# Altium footprint library TitansLib.PcbLib: 333 footprints (part 6 of 21)
Each footprint in its own frame and in the unit in brackets; x right, y up, seen from the top. Pads: shape width x height; smd on the part's side, far side on the other; paste and mask are expansions set on the pad; w line width, h text height; cw(c..) or ccw(c..) is an arc to the next point about the centre after c.
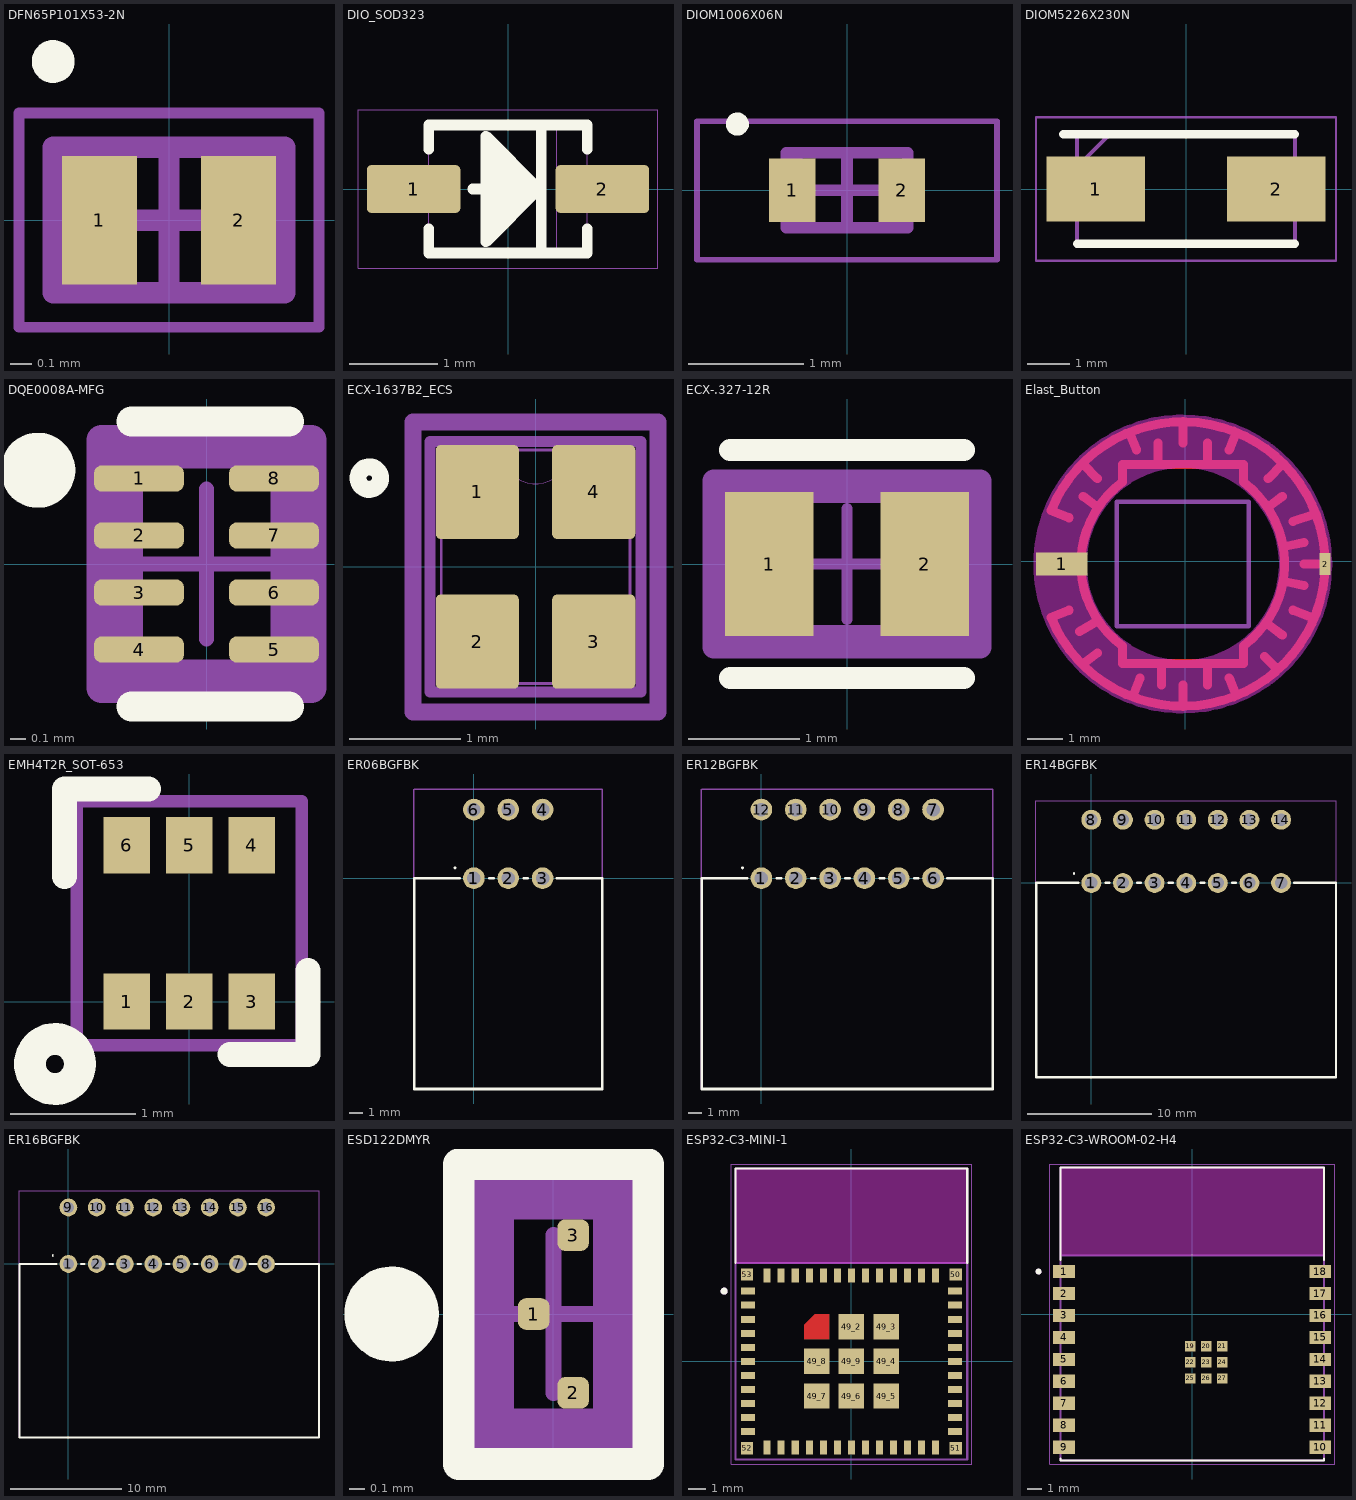
[diagram p5: the footprints below, top view; thin cyan lines are the x and y axes]

## DFN65P101X53-2N [mm] "DFN, 2-Leads, Body 0.61x1.01mm, Pitch 0.65mm, IPC Medium Density"
height 0.53
pads (2):
  rect 0.35x0.6 smd mask+0.05: 1(-0.325,0) 2(0.325,0)
Top Overlay:
  circle w0.1: c-0.54,0.74 r0.05
Top Courtyard:
  lines w0.05: -0.7,-0.5 0.7,-0.5 0.7,0.5 -0.7,0.5 -0.7,-0.5
  lines w0.1: -0.325,0 0.325,0 ; 0,-0.34 0,0.34
Top Assembly:
  lines w0.1: -0.54,-0.34 0.54,-0.34 0.54,0.34 -0.54,0.34 -0.54,-0.34
  text ".Designator" at -0.7,0.508 h1
3D body: height 0.53, standoff 0, extent -0.54,-0.34 0.54,0.34

## DIO_SOD323 [mm]
height 1.17
pads (2):
  rrect18% 1.06x0.54 smd mask+0.05: 1(-1.07,0) 2(1.07,0)
Top Overlay:
  lines w0.12: -0.9,-0.45 -0.9,-0.725 0.9,-0.725 0.9,-0.45 ; -0.9,0.45 -0.9,0.725 0.9,0.725 0.9,0.45 ; -0.4,0 0.35,0 ; -0.15,-0.45 -0.15,0.45 ; -0.075,-0.375 -0.075,0.4 ; -0.025,-0.325 -0.025,0.35 ; 0.075,-0.2 0.075,0.225 ; 0.175,-0.1 0.175,0.125 ; 0.375,-0.725 0.375,0.725 ; 0.35,0 -0.25,0.6 -0.25,-0.6 0.35,0
Top Courtyard:
  lines w0.01: -1.7,-0.9 1.7,-0.9 1.7,0.9 -1.7,0.9 -1.7,-0.9
Top Assembly:
  lines w0.01: 0.55,-0.725 0.55,0.725 ; -0.9,-0.725 -0.9,0.725 0.9,0.725 0.9,-0.725 -0.9,-0.725
  text "K" at 1.892,-0.406 h1.2
3D body: height 1.17, standoff 0, extent -0.96,-0.785 0.96,0.785
3D body "SOD323.STEP": height 1.1, standoff 0, extent -1.3,-0.675 1.3,0.675

## DIOM1006X06N [mm] "Molded Diode, 2-Leads, Body 1,00x0,60mm, IPC Medium Density"
height 0.55
pads (2):
  rect 0.4x0.55 smd: 1(-0.475,0) 2(0.475,0)
Top Overlay:
  circle w0.1: c-0.95,0.575 r0.05
Top Courtyard:
  lines w0.05: -1.3,-0.6 1.3,-0.6 1.3,0.6 -1.3,0.6 -1.3,-0.6
  lines w0.1: -0.325,0 0.325,0 ; 0,-0.325 0,0.325
Top Assembly:
  rectangle: -0.525,-0.325 -0.384,0.325
  lines w0.1: -0.525,-0.325 0.525,-0.325 0.525,0.325 -0.525,0.325 -0.525,-0.325

## DIOM5226X230N [mm]
pads (2):
  rect 2.35x1.55 smd: 1(-2.15,0) 2(2.15,0)
Top Overlay:
  lines w0.2: -2.925,1.302 2.598,1.302 ; -2.598,-1.302 2.598,-1.302
Mechanical 13:
  lines w0.1: -2.598,0.528 -1.822,1.302 ; -2.598,-1.302 2.598,-1.302 2.598,1.302 -2.598,1.302 -2.598,-1.302
Mechanical 15:
  lines w0.05: -3.575,-1.71 3.575,-1.71 3.575,1.71 -3.575,1.71 -3.575,-1.71
3D body "B240A-13-F.stp": height 2.3, standoff 0, extent -2.598,-1.302 2.598,1.302

## DQE0008A-MFG [mm]
pads (8):
  rrect60% 0.6x0.175 smd paste+0 mask+0.05: 1(-0.45,0.571) 2(-0.45,0.19) 3(-0.45,-0.19) 4(-0.45,-0.571) 5(0.45,-0.571) 6(0.45,-0.19) 7(0.45,0.19) 8(0.45,0.571)
Top Overlay:
  circle w0.25: c-1.125,0.625 r0.125
  lines w0.2: -0.5,-0.95 0.55,-0.95 ; -0.5,0.95 0.55,0.95
Top 3D Body:
  lines w0.2: -0.525,-0.737 0.525,-0.737 0.525,0.737 -0.525,0.737 -0.525,-0.737
Top Courtyard:
  lines w0.2: -0.7,-0.825 0.7,-0.825 0.7,0.825 -0.7,0.825 -0.7,-0.825
Top Component Center:
  lines w0.1: -0.5,0 0.5,0 ; 0,-0.5 0,0.5
Top Assembly:
  lines w0.2: -0.7,-0.825 0.7,-0.825 0.7,0.825 -0.7,0.825 -0.7,-0.825
  text ".Designator" at -1.3,1.238 h1
3D body "IC_Texas_Instruments_LSF0102DQER_eec.STEP": height 0.25, standoff 0, extent -0.7,-0.825 0.7,0.825

## ECX-1637B2_ECS [mm]
pads (4):
  rrect12% 0.75x0.85 smd paste+0 mask+0.05: 1(-0.525,0.675) 2(-0.525,-0.675) 3(0.525,-0.675) 4(0.525,0.675)
Top Overlay:
  circle w0.152: c-1.5,0.8 r0.102
Top Assembly:
  lines w0.1: -0.951,-1.13 0.951,-1.13 0.951,1.13 -0.951,1.13 -0.951,-1.13
  text ".Designator" at -1.105,1.471 h1
Mechanical 13:
  circle w0: c-0.279,0.675 r0.076
  lines w0: -0.305,1.054 ccw(c0,1.054) 0.305,1.054
  lines w0.025: -0.851,-1.054 -0.851,1.054 0.851,1.054 0.851,-1.054 -0.851,-1.054
Mechanical 15:
  lines w0.152: -1.105,-1.308 1.105,-1.308 1.105,-1.259 1.105,1.259 1.105,1.308 -1.105,1.308 -1.105,1.259 -1.105,-1.259 -1.105,-1.308
3D body "ECS-400-10-37B2-CKY-TR.STEP": height 0.01, standoff -0.49, extent -0.8,-1 0.8,1

## ECX-.327-12R [mm]
pads (2):
  rect 0.8x1.3 smd paste+0 mask+0: 1(-0.7,0) 2(0.7,0)
Top Overlay:
  lines w0.2: -1.05,-1.025 1.05,-1.025 ; -1.05,1.025 1.05,1.025
Top 3D Body:
  lines w0.2: -1.05,-0.65 1.05,-0.65 1.05,0.65 -1.05,0.65 -1.05,-0.65
Top Courtyard:
  lines w0.2: -1.2,-0.75 1.2,-0.75 1.2,0.75 -1.2,0.75 -1.2,-0.75
Top Component Center:
  lines w0.1: -0.5,0 0.5,0 ; 0,-0.5 0,0.5
Top Assembly:
  lines w0.2: -1.2,-0.75 1.2,-0.75 1.2,0.75 -1.2,0.75 -1.2,-0.75
  text ".Designator" at -0.752,1.213 h1
3D body "Crys_ECS_International_ECS-_327-12_5-12R-TR_eec.STEP": height 0.25, standoff 0, extent -1.2,-0.75 1.2,0.75

## Elast_Button [mil]
pads (2):
  rect 57.09x25 smd paste+0: 1(-136.82,-2.95)
  rect 12x24 smd paste+0: 2(154.52,-2.95)
Top Layer:
  lines w10: -128.94,-54.13 -148.63,-62.01 ccw(c-2.95,-2.95) -148.63,56.11 -128.94,48.23 ; -117.13,-77.75 -97.45,-65.94 ; -113.2,-113.19 -97.45,-101.38 ; -113.2,71.85 -97.45,60.04 ; -113.2,107.29 -97.45,91.54 ; -62.02,142.72 -54.14,123.03 ; -58.08,-148.62 -50.2,-128.93 ; -30.52,130.91 -30.52,107.29 ; -26.58,-136.81 -26.58,-113.19 ; -2.96,-160.43 -2.96,-136.81 ; -2.96,130.91 -2.96,154.53 ; 24.6,-136.81 24.6,-113.19 ; 24.6,130.91 24.6,107.29 ; 48.22,-128.93 56.1,-148.62 ; 48.22,123.03 56.1,142.72 ; 87.59,-105.31 99.4,-117.12 ; 91.53,-69.88 107.28,-81.69 ; 91.53,60.04 107.28,71.85 ; 91.53,91.54 107.28,107.29 ; 111.21,-22.64 130.9,-26.57 ; 111.21,16.74 130.9,20.67 ; 119.09,-54.13 138.77,-62.01 ; 119.09,44.29 142.71,52.17 ; 130.9,-2.95 154.52,-2.95 ; -30.52,107.29 24.6,107.29 ; -30.52,107.29 -69.89,107.29 -69.89,87.6 ccw(c-2.96,-2.95) -69.89,-93.5 -69.89,-113.19 -26.58,-113.19 ; -26.58,-113.19 24.6,-113.19 ; 24.6,-113.19 63.97,-113.19 63.97,-93.5 ccw(c-2.96,-2.95) 63.97,87.6 63.97,107.29 24.6,107.29
Top Layer keep-out:
  circle w59.06: c-2.96,-2.95 r135.83
Top Solder:
  circle w55.12: c-2.96,-2.95 r134.67
Top Assembly:
  lines w5: -75.79,-71.85 -75.79,65.95 69.87,65.95 69.87,-71.85 -75.79,-71.85

## EMH4T2R_SOT-653 [mm]
pads (6):
  rect 0.37x0.45 smd mask+0.03: 1(-0.5,0) 2(0,0) 3(0.5,0) 4(0.5,1.25) 5(0,1.25) 6(-0.5,1.25)
Top Overlay:
  circle w0.254: c-1.075,-0.5 r0.2
  lines w0.2: -1,1 -1,1.7 -0.325,1.7 ; 0.325,-0.425 0.95,-0.425 0.95,0.25
Top Courtyard:
  lines w0.1: -0.9,-0.35 0.9,-0.35 0.9,1.6 -0.75,1.6 -0.9,1.6 -0.9,-0.35
3D body "EMH4T2R.stp": height 0.5, standoff -0.01, extent -0.8,-0.175 0.8,1.425

## ER06BGFBK [mm]
pads (6):
  round 1.6 hole 1: 1(0,0) 2(2.54,0) 3(5.08,0) 4(5.08,5.08) 5(2.54,5.08) 6(0,5.08)
Top Overlay:
  lines w0.1: -1.447,0.762 ccw(c-1.397,0.762) -1.347,0.762 ccw(c-1.397,0.762) -1.447,0.762
  lines w0.2: -1.067,0 -4.41,0 -4.41,-15.6 9.49,-15.6 9.49,0 6.147,0 ; 1.148,0 1.448,0 ; 3.688,0 3.988,0
Mechanical 13:
  lines w0.1: -4.41,0 -4.41,-15.6 9.49,-15.6 9.49,0
Mechanical 15:
  lines w0.1: -4.445,6.6 -4.445,-15.6 9.49,-15.6 9.49,6.6 -4.41,6.6
3D body: height 7.5, standoff 0, extent -4.445,-15.6 9.49,0

## ER12BGFBK [mm]
pads (12):
  round 1.6 hole 1: 1(0,0) 2(2.54,0) 3(5.08,0) 4(7.62,0) 5(10.16,0) 6(12.7,0) 7(12.7,5.08) 8(10.16,5.08) 9(7.62,5.08) 10(5.08,5.08) 11(2.54,5.08) 12(0,5.08)
Top Overlay:
  lines w0.1: -1.447,0.762 cw(c-1.397,0.762) -1.347,0.762 cw(c-1.397,0.762) -1.447,0.762
  lines w0.2: -1.067,0 -4.41,0 -4.41,-15.6 17.11,-15.6 17.11,0 13.767,0 ; 1.148,0 1.448,0 ; 3.688,0 3.988,0 ; 6.228,0 6.528,0 ; 8.768,0 9.068,0 ; 11.308,0 11.608,0
Mechanical 13:
  lines w0.1: -4.41,0 -4.41,-15.6 9.49,-15.6 ; 17.11,-15.6 17.11,0
Mechanical 15:
  lines w0.1: -4.445,6.6 -4.445,-15.6 9.49,-15.6 ; -4.41,6.6 17.11,6.6 17.11,-15.6
3D body: height 7.5, standoff 0, extent -4.445,-15.6 17.11,0

## ER14BGFBK [mm]
pads (14):
  round 1.6 hole 1: 1(0,0) 2(2.54,0) 3(5.08,0) 4(7.62,0) 5(10.16,0) 6(12.7,0) 7(15.24,0) 8(0,5.08) 9(2.54,5.08) 10(5.08,5.08) 11(7.62,5.08) 12(10.16,5.08) 13(12.7,5.08) 14(15.24,5.08)
Top Overlay:
  lines w0.1: -1.447,0.762 ccw(c-1.397,0.762) -1.347,0.762 ccw(c-1.397,0.762) -1.447,0.762
  lines w0.2: -1.067,0 -4.41,0 -4.41,-15.6 19.65,-15.6 19.65,0 16.307,0 ; 1.148,0 1.448,0 ; 3.688,0 3.988,0 ; 6.228,0 6.528,0 ; 8.768,0 9.068,0 ; 11.308,0 11.608,0
Mechanical 13:
  lines w0.1: -4.41,0 -4.41,-15.6 9.49,-15.6 ; 19.65,-15.6 19.65,0
Mechanical 15:
  lines w0.1: -4.445,6.6 -4.445,-15.6 9.49,-15.6 ; -4.41,6.6 19.65,6.6 19.65,-15.6
3D body: height 7.5, standoff 0, extent -4.445,-15.6 19.65,0

## ER16BGFBK [mm]
pads (16):
  round 1.6 hole 1: 1(0,0) 2(2.54,0) 3(5.08,0) 4(7.62,0) 5(10.16,0) 6(12.7,0) 7(15.24,0) 8(17.78,0) 9(0,5.08) 10(2.54,5.08) 11(5.08,5.08) 12(7.62,5.08) 13(10.16,5.08) 14(12.7,5.08) 15(15.24,5.08) 16(17.78,5.08)
Top Overlay:
  lines w0.1: -1.447,0.762 ccw(c-1.397,0.762) -1.347,0.762 ccw(c-1.397,0.762) -1.447,0.762
  lines w0.2: -1.067,0 -4.41,0 -4.41,-15.6 22.534,-15.6 22.534,0 16.307,0 ; 1.148,0 1.448,0 ; 3.688,0 3.988,0 ; 6.228,0 6.528,0 ; 8.768,0 9.068,0 ; 11.308,0 11.608,0
Mechanical 13:
  lines w0.1: -4.41,0 -4.41,-15.6 9.49,-15.6 ; 22.534,-15.6 22.534,0
Mechanical 15:
  lines w0.1: -4.445,6.6 -4.445,-15.6 9.49,-15.6 ; -4.41,6.6 22.534,6.6 22.534,-15.6
3D body "WingTAT ER16BGFBK.step": height 9.25, standoff -5, extent -4.454,-15.414 22.456,5.266

## ESD122DMYR [mm]
pads (3):
  rrect50% 0.2x0.2 smd paste-1000 mask-1000: 1(-0.125,0) 2(0.125,-0.5) 3(0.125,0.5)
Top Overlay:
  circle w0.3: c-1.025,0 r0.15
  lines w0.2: -0.6,-0.95 -0.6,0.95 0.6,0.95 0.6,-0.95 -0.6,-0.95
Top Paste:
  region: -0.02,0.055 -0.02,-0.055 -0.02,-0.065 -0.028,-0.083 -0.042,-0.097 -0.06,-0.105 -0.07,-0.105 -0.18,-0.105 -0.19,-0.105 -0.208,-0.097 -0.222,-0.083 -0.23,-0.065 -0.23,-0.055 -0.23,0.055 -0.23,0.065 -0.222,0.083 -0.208,0.097 -0.19,0.105 -0.18,0.105 -0.07,0.105 -0.06,0.105 -0.042,0.097 -0.028,0.083 -0.02,0.065
  region: 0.23,0.555 0.23,0.445 0.23,0.435 0.222,0.417 0.208,0.403 0.19,0.395 0.18,0.395 0.07,0.395 0.06,0.395 0.042,0.403 0.028,0.417 0.02,0.435 0.02,0.445 0.02,0.555 0.02,0.565 0.028,0.583 0.042,0.597 0.06,0.605 0.07,0.605 0.18,0.605 0.19,0.605 0.208,0.597 0.222,0.583 0.23,0.565
  region: 0.02,-0.555 0.02,-0.445 0.02,-0.435 0.028,-0.417 0.042,-0.403 0.06,-0.395 0.07,-0.395 0.18,-0.395 0.19,-0.395 0.208,-0.403 0.222,-0.417 0.23,-0.435 0.23,-0.445 0.23,-0.555 0.23,-0.565 0.222,-0.583 0.208,-0.597 0.19,-0.605 0.18,-0.605 0.07,-0.605 0.06,-0.605 0.042,-0.597 0.028,-0.583 0.02,-0.565
Top Solder:
  region: -0.02,0.055 -0.02,-0.055 -0.02,-0.065 -0.028,-0.083 -0.042,-0.097 -0.06,-0.105 -0.07,-0.105 -0.18,-0.105 -0.19,-0.105 -0.208,-0.097 -0.222,-0.083 -0.23,-0.065 -0.23,-0.055 -0.23,0.055 -0.23,0.065 -0.222,0.083 -0.208,0.097 -0.19,0.105 -0.18,0.105 -0.07,0.105 -0.06,0.105 -0.042,0.097 -0.028,0.083 -0.02,0.065
  region: 0.23,0.555 0.23,0.445 0.23,0.435 0.222,0.417 0.208,0.403 0.19,0.395 0.18,0.395 0.07,0.395 0.06,0.395 0.042,0.403 0.028,0.417 0.02,0.435 0.02,0.445 0.02,0.555 0.02,0.565 0.028,0.583 0.042,0.597 0.06,0.605 0.07,0.605 0.18,0.605 0.19,0.605 0.208,0.597 0.222,0.583 0.23,0.565
  region: 0.02,-0.555 0.02,-0.445 0.02,-0.435 0.028,-0.417 0.042,-0.403 0.06,-0.395 0.07,-0.395 0.18,-0.395 0.19,-0.395 0.208,-0.403 0.222,-0.417 0.23,-0.435 0.23,-0.445 0.23,-0.555 0.23,-0.565 0.222,-0.583 0.208,-0.597 0.19,-0.605 0.18,-0.605 0.07,-0.605 0.06,-0.605 0.042,-0.597 0.028,-0.583 0.02,-0.565
Top 3D Body:
  lines w0.2: -0.35,-0.7 -0.35,0.7 0.35,0.7 0.35,-0.7 -0.35,-0.7
Top Courtyard:
  lines w0.2: -0.45,-0.8 -0.45,0.8 0.45,0.8 0.45,-0.8 -0.45,-0.8
Top Component Center:
  lines w0.1: -0.5,0 0.5,0 ; 0,-0.5 0,0.5
Top Assembly:
  lines w0.2: -0.45,-0.8 -0.45,0.8 0.45,0.8 0.45,-0.8 -0.45,-0.8
  text ".Designator" at -0.875,1.238 h1
3D body "IC_Texas_Instruments_ESD122DMYR_eec.STEP": height 0.25, standoff 0, extent -0.45,-0.8 0.45,0.8

## ESP32-C3-MINI-1 [mm]
height 2.55
pads (61):
  rect 0.8x0.4 smd mask+0.05: 1(-5.9,4) 2(-5.9,3.2) 3(-5.9,2.4) 4(-5.9,1.6) 5(-5.9,0.8) 6(-5.9,0) 7(-5.9,-0.8) 8(-5.9,-1.6) 9(-5.9,-2.4) 10(-5.9,-3.2) 11(-5.9,-4) 25(5.9,-4) 26(5.9,-3.2) 27(5.9,-2.4) 28(5.9,-1.6) 29(5.9,-0.8) 30(5.9,0) 31(5.9,0.8) 32(5.9,1.6) 33(5.9,2.4) 34(5.9,3.2) 35(5.9,4)
  rect 0.4x0.8 smd mask+0.05: 12(-4.8,-4.9) 13(-4,-4.9) 14(-3.2,-4.9) 15(-2.4,-4.9) 16(-1.6,-4.9) 17(-0.8,-4.9) 18(0,-4.9) 19(0.8,-4.9) 20(1.6,-4.9) 21(2.4,-4.9) 22(3.2,-4.9) 23(4,-4.9) 24(4.8,-4.9) 36(4.8,4.9) 37(4,4.9) 38(3.2,4.9) 39(2.4,4.9) 40(1.6,4.9) 41(0.8,4.9) 42(0,4.9) 43(-0.8,4.9) 44(-1.6,4.9) 45(-2.4,4.9) 46(-3.2,4.9) 47(-4,4.9) 48(-4.8,4.9)
  round 0.025 smd paste-2539.97 mask+0.05: 49_1(-1.975,1.975)
  rect 1.45x1.45 smd mask+0.05: 49_2(0,1.975) 49_3(1.975,1.975) 49_4(1.975,0) 49_5(1.975,-1.975) 49_6(0,-1.975) 49_7(-1.975,-1.975) 49_8(-1.975,0) 49_9(0,0)
  rect 0.7x0.7 smd mask+0.05: 50(5.95,4.95) 51(5.95,-4.95) 52(-5.95,-4.95) 53(-5.95,4.95)
Top Layer:
  region: -1.25,1.25 -2.7,1.25 -2.7,2.1 -2.1,2.7 -1.25,2.7
Top Overlay:
  circle w0.2: c-7.25,4 r0.1
  lines w0.127: -6.6,5.62 -6.6,11 6.6,11 6.6,5.62
Top Paste:
  region: -1.25,1.25 -2.7,1.25 -2.7,2.1 -2.1,2.7 -1.25,2.7
Keep-Out Layer:
  region: 6.6,5.6 -6.6,5.6 -6.6,11 6.6,11
  region: 6.6,5.6 -6.6,5.6 -6.6,11 6.6,11
Mechanical 13:
  circle w0.2: c-7.25,4 r0.1
  lines w0.127: -6.6,5.6 -6.6,-5.6 6.6,-5.6 6.6,5.6 ; -6.6,5.6 -6.6,11 6.6,11 6.6,5.6 ; -6.6,5.6 6.6,5.6
Mechanical 15:
  lines w0.05: -6.85,-5.85 -6.85,11.25 6.85,11.25 6.85,-5.85 -6.85,-5.85
3D body "ESP32-C3-MINI-1-N4--3DModel-STEP-418109.STEP": height 2.56, standoff 0.01, extent -6.6,-5.6 6.6,11

## ESP32-C3-WROOM-02-H4 [mm]
pads (27):
  rect 1.5x0.9 smd: 1(-8.75,2.9) 2(-8.75,1.4) 3(-8.75,-0.1) 4(-8.75,-1.6) 5(-8.75,-3.1) 6(-8.75,-4.6) 7(-8.75,-6.1) 8(-8.75,-7.6) 9(-8.75,-9.1) 10(8.75,-9.1) 11(8.75,-7.6) 12(8.75,-6.1) 13(8.75,-4.6) 14(8.75,-3.1) 15(8.75,-1.6) 16(8.75,-0.1) 17(8.75,1.4) 18(8.75,2.9)
  rect 0.7x0.7 smd: 19(-0.14,-2.2) 20(0.96,-2.2) 21(2.06,-2.2) 22(-0.14,-3.3) 23(0.96,-3.3) 24(2.06,-3.3) 25(-0.14,-4.4) 26(0.96,-4.4) 27(2.06,-4.4)
Top Overlay:
  circle w0.2: c-10.5,2.9 r0.1
  lines w0.127: -9,-9.87 -9,-10 9,-10 9,-9.87 ; -9,3.67 -9,10 9,10 9,3.67
Keep-Out Layer:
  region: 9,4 -9,4 -9,10 9,10
  region: 9,4 -9,4 -9,10 9,10
Mechanical 13:
  circle w0.2: c-10.5,2.9 r0.1
  lines w0.127: -9,4 -9,10 9,10 9,4 ; -9,4 -9,-10 9,-10 9,4 ; -9,4 9,4
Mechanical 15:
  lines w0.05: -9.75,-10.25 -9.75,10.25 9.75,10.25 9.75,-10.25 -9.75,-10.25
3D body "step_temp.STEP": height 3.35, standoff 0, extent -9,-10 9,10